# Altium schematic symbol library 2019-10-10_10-37-25.SchLib: 1 symbol
Pins are listed as number, name and electrical type; pins without a type are passive.

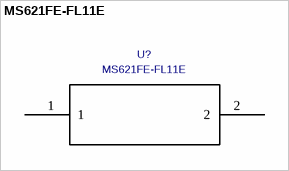
[diagram p0: symbol MS621FE-FL11E]

## MS621FE-FL11E
designator U?
C: Copyright (C) 2018 Accelerated Designs. All rights reserved; Vendor: Seiko Epson Corporation; Built_By: EMA_TJ; Value: MS621FE-FL11E; Copyright: Copyright (C) 2018 Accelerated Designs. All rights reserved; Manufacturer_Part_Number: MS621FE-FL11E
footprint MS621FE-FL11E
pins: 1, 2